# Altium footprint library FootPrintLib_12.PcbLib: 319 footprints (part 3 of 20)
Each footprint in its own frame and in the unit in brackets; x right, y up, seen from the top. Pads: shape width x height; smd on the part's side, far side on the other; paste and mask are expansions set on the pad; w line width, h text height; cw(c..) or ccw(c..) is an arc to the next point about the centre after c.
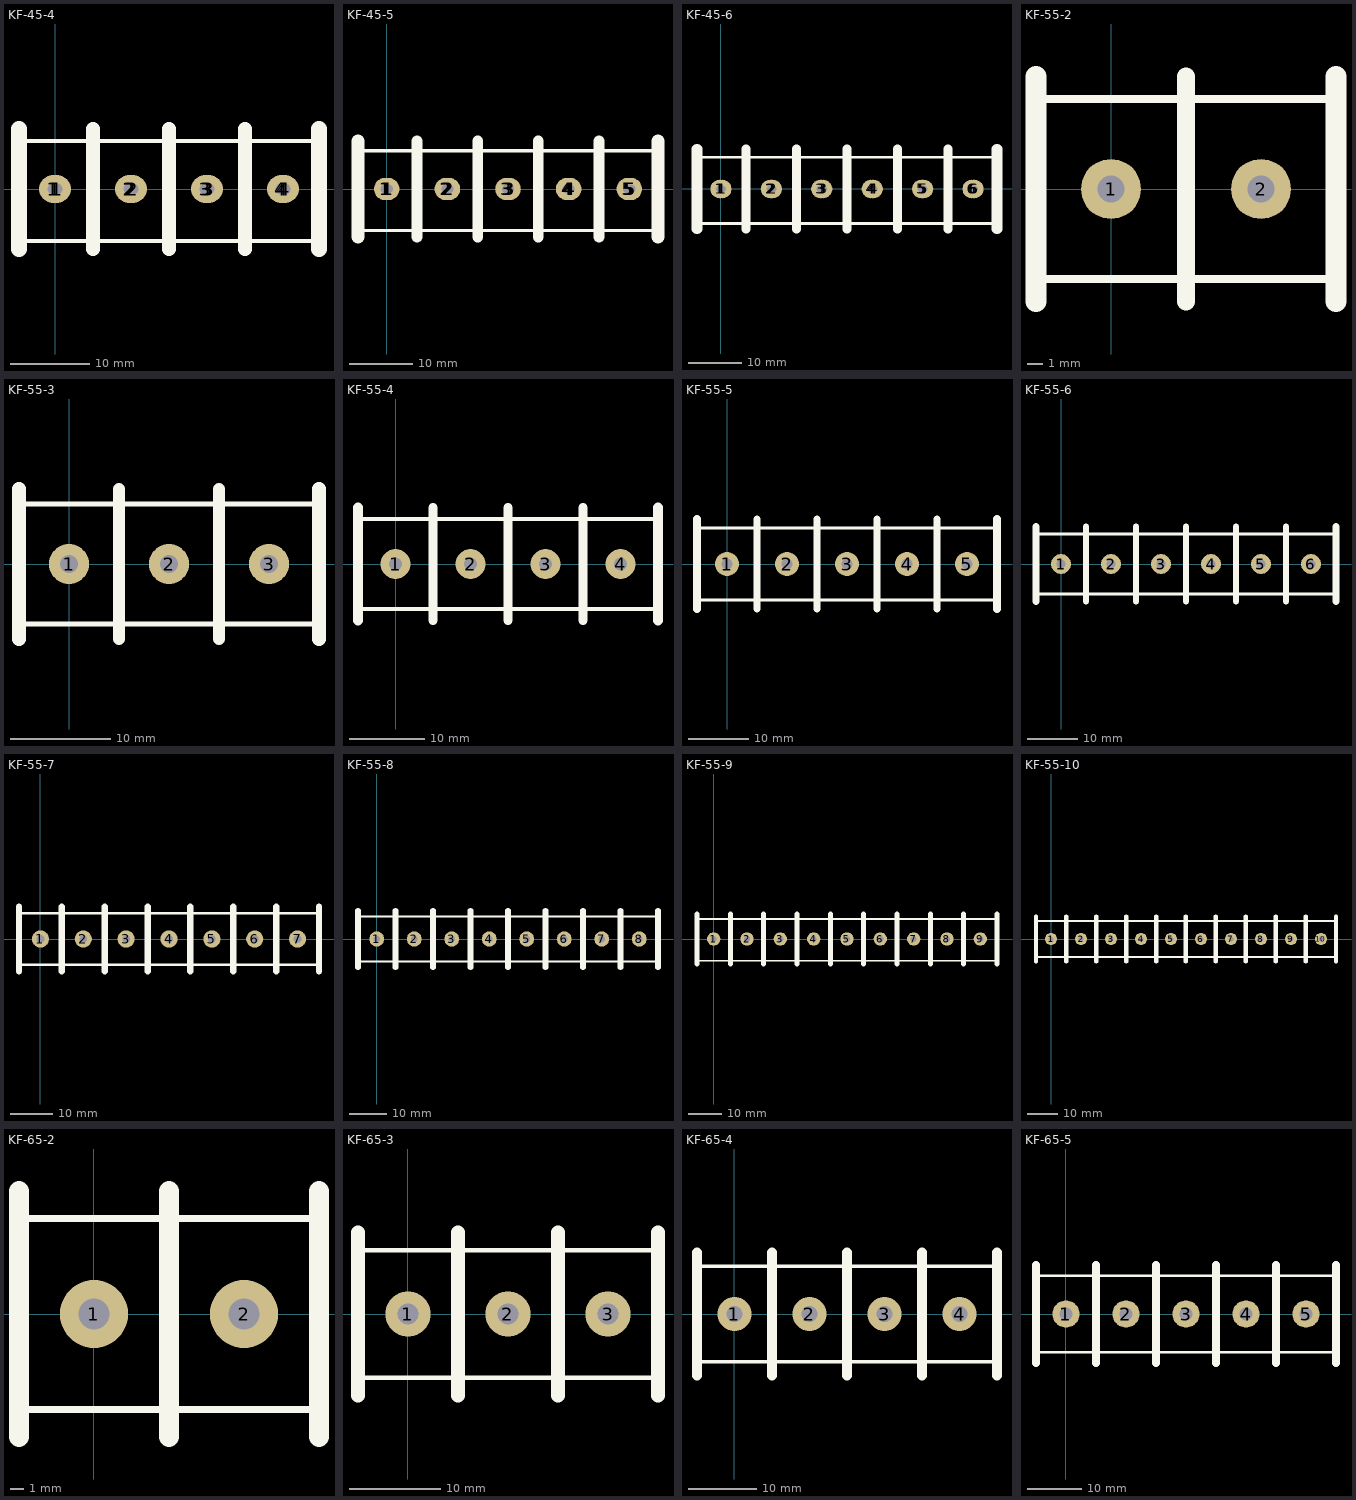
[diagram p2: the footprints below, top view; thin cyan lines are the x and y axes]

## KF-45-4 [mm]
pads (12):
  round 3.5 hole 1.4: 1(-0.25,0) 1(0,0) 1(0.25,0) 2(9.25,0) 2(9.5,0) 2(9.75,0) 3(18.75,0) 3(19,0) 3(19.25,0) 4(28.25,0) 4(28.5,0) 4(28.75,0)
Top Overlay:
  lines w0.508: -4.5,-6.5 33,-6.5 ; -4.5,6 33,6
  lines w1.7: 4.75,-7.5 4.75,7.5 ; 14.25,-7.5 14.25,7.5 ; 23.75,-7.5 23.75,7.5
  lines w2: -4.5,-7.5 -4.5,7.5 ; 33,-7.5 33,7.5

## KF-45-5 [mm]
pads (15):
  round 3.5 hole 1.4: 1(-0.25,0) 1(0,0) 1(0.25,0) 2(9.25,0) 2(9.5,0) 2(9.75,0) 3(18.75,0) 3(19,0) 3(19.25,0) 4(28.25,0) 4(28.5,0) 4(28.75,0) 5(37.75,0) 5(38,0) 5(38.25,0)
Top Overlay:
  lines w0.508: -4.5,-6.5 42.5,-6.5 ; -4.5,6 42.5,6
  lines w1.7: 4.75,-7.5 4.75,7.5 ; 14.25,-7.5 14.25,7.5 ; 23.75,-7.5 23.75,7.5 ; 33.25,-7.5 33.25,7.5
  lines w2: -4.5,-7.5 -4.5,7.5 ; 42.5,-7.5 42.5,7.5

## KF-45-6 [mm]
pads (18):
  round 3.5 hole 1.4: 1(-0.25,0) 1(0,0) 1(0.25,0) 2(9.25,0) 2(9.5,0) 2(9.75,0) 3(18.75,0) 3(19,0) 3(19.25,0) 4(28.25,0) 4(28.5,0) 4(28.75,0) 5(37.75,0) 5(38,0) 5(38.25,0) 6(47.25,0) 6(47.5,0) 6(47.75,0)
Top Overlay:
  lines w0.508: -4.5,-6.5 52,-6.5 ; -4.5,6 52,6
  lines w1.7: 4.75,-7.5 4.75,7.5 ; 14.25,-7.5 14.25,7.5 ; 23.75,-7.5 23.75,7.5 ; 33.25,-7.5 33.25,7.5 ; 42.75,-7.5 42.75,7.5
  lines w2: -4.5,-7.5 -4.5,7.5 ; 52,-7.5 52,7.5

## KF-55-2 [mm]
pads (2):
  round 4 hole 1.8: 1(0,0) 2(10,0)
Top Overlay:
  lines w0.508: -5,-6 15,-6 ; -5,6 15,6
  lines w1.2: 5,-7.5 5,7.5
  lines w1.4: -5,-7.5 -5,7.5 ; 15,-7.5 15,7.5

## KF-55-3 [mm]
pads (3):
  round 4 hole 1.8: 1(0,0) 2(10,0) 3(20,0)
Top Overlay:
  lines w0.508: -5,-6 25,-6 ; -5,6 25,6
  lines w1.2: 5,-7.5 5,7.5 ; 15,-7.5 15,7.5
  lines w1.4: -5,-7.5 -5,7.5 ; 25,-7.5 25,7.5

## KF-55-4 [mm]
pads (4):
  round 4 hole 1.8: 1(0,0) 2(10,0) 3(20,0) 4(30,0)
Top Overlay:
  lines w0.508: -5,-6 35,-6 ; -5,6 35,6
  lines w1.2: 5,-7.5 5,7.5 ; 15,-7.5 15,7.5 ; 25,-7.5 25,7.5
  lines w1.4: -5,-7.5 -5,7.5 ; 35,-7.5 35,7.5

## KF-55-5 [mm]
pads (5):
  round 4 hole 1.8: 1(0,0) 2(10,0) 3(20,0) 4(30,0) 5(40,0)
Top Overlay:
  lines w0.508: -5,-6 45,-6 ; -5,6 45,6
  lines w1.2: 5,-7.5 5,7.5 ; 15,-7.5 15,7.5 ; 25,-7.5 25,7.5 ; 35,-7.5 35,7.5
  lines w1.4: -5,-7.5 -5,7.5 ; 45,-7.5 45,7.5

## KF-55-6 [mm]
pads (6):
  round 4 hole 1.8: 1(0,0) 2(10,0) 3(20,0) 4(30,0) 5(40,0) 6(50,0)
Top Overlay:
  lines w0.508: -5,-6 55,-6 ; -5,6 55,6
  lines w1.2: 5,-7.5 5,7.5 ; 15,-7.5 15,7.5 ; 25,-7.5 25,7.5 ; 35,-7.5 35,7.5 ; 45,-7.5 45,7.5
  lines w1.4: -5,-7.5 -5,7.5 ; 55,-7.5 55,7.5

## KF-55-7 [mm]
pads (7):
  round 4 hole 1.8: 1(0,0) 2(10,0) 3(20,0) 4(30,0) 5(40,0) 6(50,0) 7(60,0)
Top Overlay:
  lines w0.508: -5,-6 64.77,-6 ; -5,6 65,6
  lines w1.5: -5,-7.5 -5,7.5 ; 5,-7.5 5,7.5 ; 15,-7.5 15,7.5 ; 25,-7.5 25,7.5 ; 35,-7.5 35,7.5 ; 45,-7.5 45,7.5 ; 55,-7.5 55,7.5 ; 65,-7.5 65,7.5

## KF-55-8 [mm]
pads (8):
  round 4 hole 1.8: 1(0,0) 2(10,0) 3(20,0) 4(30,0) 5(40,0) 6(50,0) 7(60,0) 8(70,0)
Top Overlay:
  lines w0.508: -5,-6 75,-6 ; -5,6 75,6
  lines w1.5: -5,-7.5 -5,7.5 ; 5,-7.5 5,7.5 ; 15,-7.5 15,7.5 ; 25,-7.5 25,7.5 ; 35,-7.5 35,7.5 ; 45,-7.5 45,7.5 ; 55,-7.5 55,7.5 ; 65,-7.5 65,7.5 ; 75,-7.5 75,7.5

## KF-55-9 [mm]
pads (9):
  round 4 hole 1.8: 1(0,0) 2(10,0) 3(20,0) 4(30,0) 5(40,0) 6(50,0) 7(60,0) 8(70,0) 9(80,0)
Top Overlay:
  lines w0.508: -5,-6.5 85,-6.5 ; -5,6 85,6
  lines w1.5: -5,-7.5 -5,7.5 ; 5,-7.5 5,7.5 ; 15,-7.5 15,7.5 ; 25,-7.5 25,7.5 ; 35,-7.5 35,7.5 ; 45,-7.5 45,7.5 ; 55,-7.5 55,7.5 ; 65,-7.5 65,7.5 ; 75,-7.5 75,7.5 ; 85,-7.5 85,7.5

## KF-55-10 [mm]
pads (10):
  round 4 hole 1.8: 1(0,0) 2(10,0) 3(20,0) 4(30,0) 5(40,0) 6(50,0) 7(60,0) 8(70,0) 9(80,0) 10(90,0)
Top Overlay:
  lines w0.508: -5,-6 95,-6 ; -5,6 95,6
  lines w1.5: -5,-7.5 -5,7.5 ; 5,-7.5 5,7.5 ; 15,-7.5 15,7.5 ; 25,-7.5 25,7.5 ; 35,-7.5 35,7.5 ; 45,-7.5 45,7.5 ; 55,-7.5 55,7.5 ; 65,-7.5 65,7.5 ; 75,-7.5 75,7.5 ; 85,-7.5 85,7.5 ; 95,-7.5 95,7.5

## KF-65-2 [mm]
pads (2):
  round 5 hole 2.3: 1(0,0) 2(11,0)
Top Overlay:
  lines w0.508: -5.5,-7 16.5,-7 ; -5.5,7 16.5,7
  lines w1.5: -5.5,-9 -5.5,9 ; 5.5,-9 5.5,9 ; 16.5,-9 16.5,9

## KF-65-3 [mm]
pads (3):
  round 5 hole 2.3: 1(0,0) 2(11,0) 3(22,0)
Top Overlay:
  lines w0.508: -5.5,-7 27.5,-7 ; -5.5,7 27.5,7
  lines w1.5: -5.5,-9 -5.5,9 ; 5.5,-9 5.5,9 ; 16.5,-9 16.5,9 ; 27.5,-9 27.5,9

## KF-65-4 [mm]
pads (4):
  round 5 hole 2.3: 1(0,0) 2(11,0) 3(22,0) 4(33,0)
Top Overlay:
  lines w0.508: -5.5,-7 38.5,-7 ; -5.5,7 38.5,7
  lines w1.5: -5.5,-9 -5.5,9 ; 5.5,-9 5.5,9 ; 16.5,-9 16.5,9 ; 27.5,-9 27.5,9 ; 38.5,-9 38.5,9

## KF-65-5 [mm]
pads (5):
  round 5 hole 2.3: 1(0,0) 2(11,0) 3(22,0) 4(33,0) 5(44,0)
Top Overlay:
  lines w0.508: -5.5,-7 49.5,-7 ; -5.5,7 49.5,7
  lines w1.5: -5.5,-9 -5.5,9 ; 5.5,-9 5.5,9 ; 16.5,-9 16.5,9 ; 27.5,-9 27.5,9 ; 38.5,-9 38.5,9 ; 49.5,-9 49.5,9